# Altium footprint library LimeMicroAltiumLib.PcbLib: 876 footprints (part 36 of 57)
Each footprint in its own frame and in the unit in brackets; x right, y up, seen from the top. Pads: shape width x height; smd on the part's side, far side on the other; paste and mask are expansions set on the pad; w line width, h text height; cw(c..) or ccw(c..) is an arc to the next point about the centre after c.
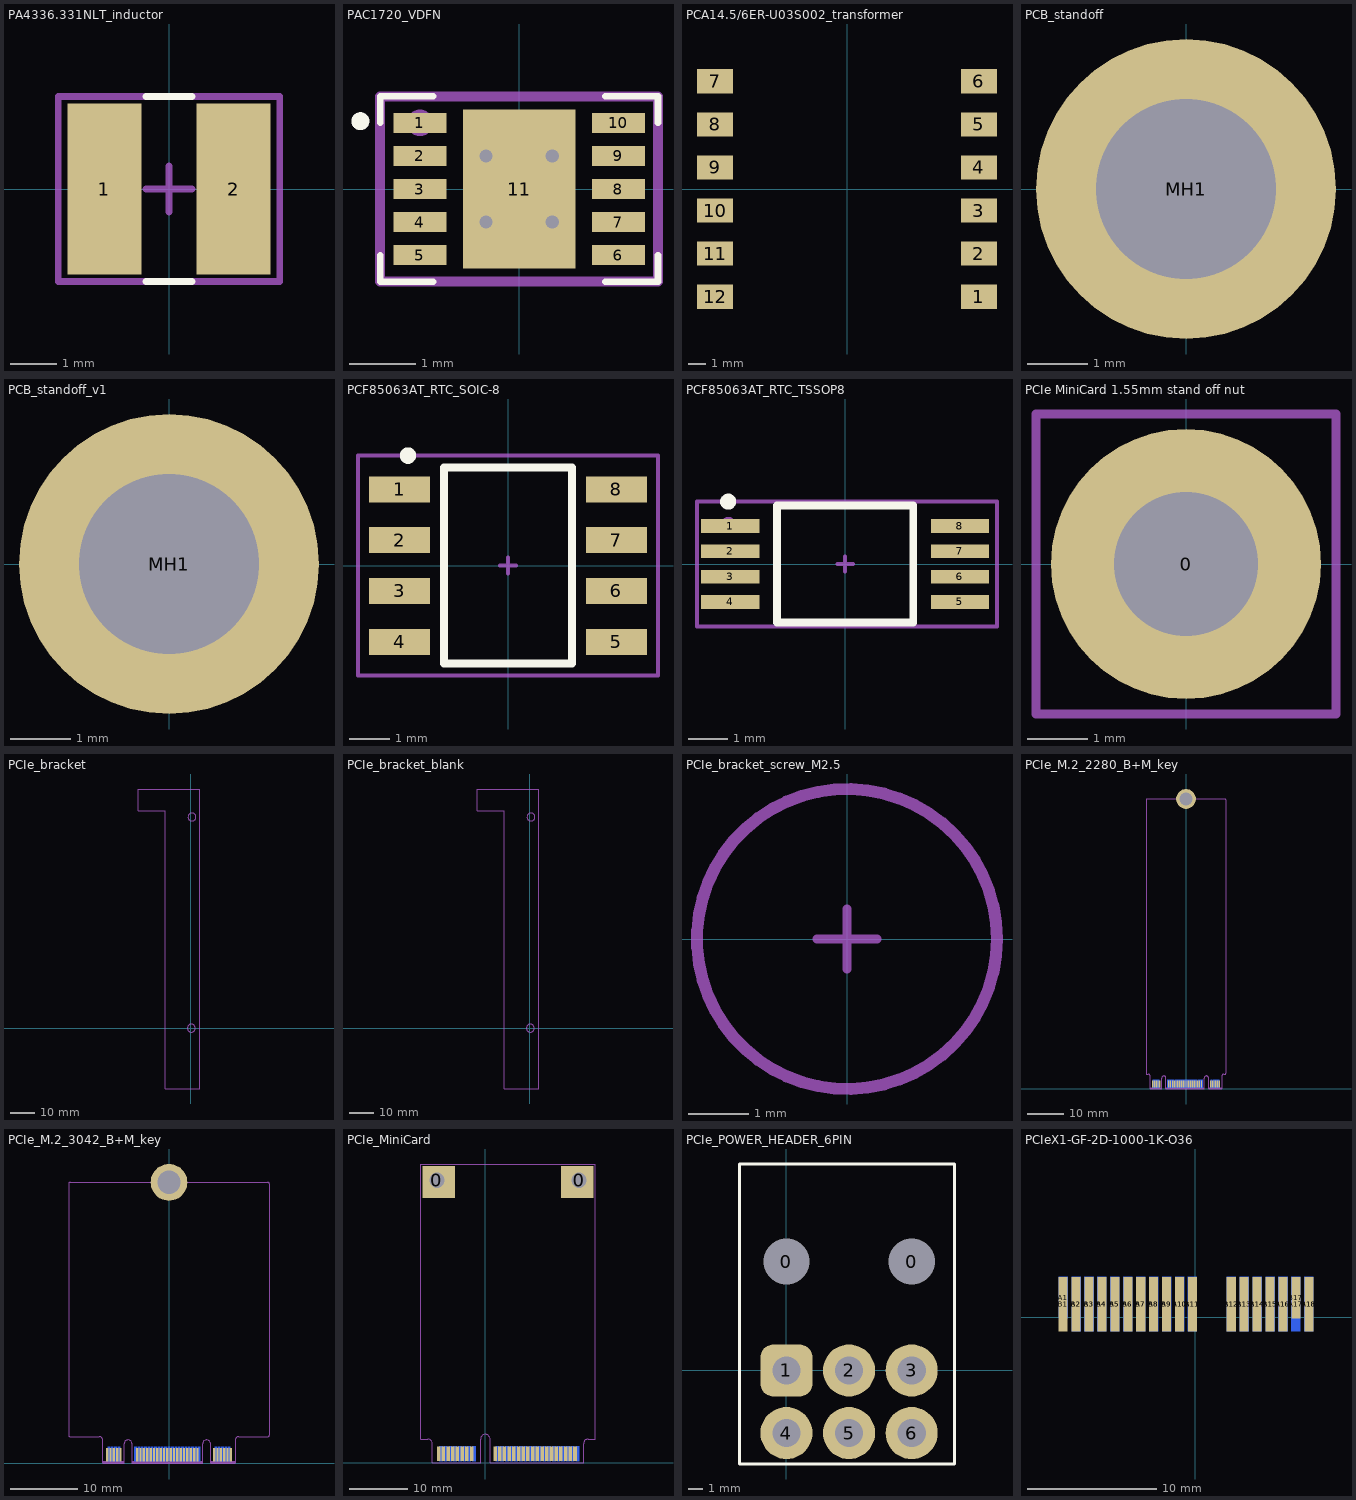
[diagram p35: the footprints below, top view; thin cyan lines are the x and y axes]

## PA4336.331NLT_inductor [mm] "PA4336.331NLT inductor"
pads (2):
  rect 1.6x3.7 smd mask+0.05: 1(-1.4,0) 2(1.4,0)
Top Overlay:
  lines w0.15: -0.5,-2 0.5,-2 ; -0.5,2 0.5,2
Mechanical 15:
  lines w0.15: -0.5,0 0.5,0 ; 0,-0.5 0,0.5 ; -2.4,-2 -2.4,2 2.4,2 2.4,-2 -2.4,-2
  text ".Designator" at 0,0 h0.55
  text "No polarity" at -1.6,-1.7 h0.3
3D body "User Library-nr3015_4x4.STEP": height 1.89, standoff -0.11, extent -2,-1.998 2.001,2.002

## PAC1720_VDFN [mm] "10-Lead Very Thin Plastic Dual Flat, No Lead Package (9Q) - 3x3 mm Body [VDFN]"
pads (11):
  rect 0.8x0.3 smd mask+0.05: 1(-1.5,1) 2(-1.5,0.5) 3(-1.5,0) 4(-1.5,-0.5) 5(-1.5,-1) 6(1.5,-1) 7(1.5,-0.5) 8(1.5,0) 9(1.5,0.5) 10(1.5,1)
  rect 1.7x2.4 smd mask+0.05: 11(0,0)
via -0.5,0.5 diameter 0.4 hole 0.2
via 0.5,0.5 diameter 0.4 hole 0.2
via 0.5,-0.5 diameter 0.4 hole 0.2
via -0.5,-0.5 diameter 0.4 hole 0.2
Top Overlay:
  circle w0.2: c-2.4,1.025 r0.035
  lines w0.1: -2.1,-1 -2.1,-1.4 -1.3,-1.4 ; -2.1,1 -2.1,1.4 -1.3,1.4 ; 1.3,-1.4 2.1,-1.4 2.1,-1 ; 1.3,1.4 2.1,1.4 2.1,1
Mechanical 15:
  circle w0.3: c-1.5,1 r0.05
  lines w0.15: -0.3,0 0.3,0 ; 0,-0.3 0,0.3 ; -2.1,-1.4 2.1,-1.4 2.1,1.4 -2.1,1.4 -2.1,-1.4
  text ".Designator" at 0,0 h0.55
3D body "User Library-My-DFN-10-3x3-0_5.STEP": height 0.8, standoff 0, extent -1.56,-1.55 1.56,1.55

## PCA14.5/6ER-U03S002_transformer [mm]
pads (12):
  rect 2.1x1.4 smd mask+0.05: 1(7.65,-6.25) 2(7.65,-3.75) 3(7.65,-1.25) 4(7.65,1.25) 5(7.65,3.75) 6(7.65,6.25) 7(-7.65,6.25) 8(-7.65,3.75) 9(-7.65,1.25) 10(-7.65,-1.25) 11(-7.65,-3.75) 12(-7.65,-6.25)

## PCB_standoff [mm]
pads (1):
  round 5 hole 3: MH1(0,0)
Mechanical 15:
  lines w0.15: -2.2,0 0,0 ; 0,-2.2 0,0 ; 0,2.2 0,0 ; 2.2,0 0,0
  text ".Designator" at 0,0 h0.55
3D body "Hex Spacer MF M3 L5mm.stp": height 5.2, standoff -5.8, extent -2.862,-2.5 2.912,2.5

## PCB_standoff_v1 [mm]
pads (1):
  round 5 hole 3: MH1(0,0)
Mechanical 15:
  lines w0.15: -2.2,0 0,0 ; 0,-2.2 0,0 ; 0,2.2 0,0 ; 2.2,0 0,0
  text ".Designator" at 0,0 h0.55
3D body "14952.stp": height 6.5, standoff -2.95, extent -3.2,-3.2 3.2,3.2

## PCF85063AT_RTC_SOIC-8 [mm]
pads (8):
  rect 1.525x0.65 smd: 1(-2.712,1.905) 2(-2.712,0.635) 3(-2.712,-0.635) 4(-2.712,-1.905) 5(2.712,-1.905) 6(2.712,-0.635) 7(2.712,0.635) 8(2.712,1.905)
Top Overlay:
  circle w0.254: c-2.5,2.75 r0.079
  lines w0.2: -1.6,-2.45 -1.6,2.45 1.6,2.45 1.6,-2.45 -1.6,-2.45
Mechanical 15:
  circle w0.254: c-2.675,1.925 r0.079
  lines w0.1: -0.2,0 0,0 ; 0,-0.2 0,0 ; 0,0.2 0,0 ; 0.2,0 0,0 ; -3.75,-2.75 -3.75,2.75 3.75,2.75 3.75,-2.75 -3.75,-2.75
  text ".Designator" at 0,0 h0.55
3D body "AD8131ARZ.stp": height 1.75, standoff 0, extent -3,-2.45 3,2.45

## PCF85063AT_RTC_TSSOP8 [mm]
pads (8):
  rect 1.5x0.35 smd mask+0.05: 1(-2.95,0.975) 2(-2.95,0.325) 3(-2.95,-0.325) 4(-2.95,-0.975) 5(2.95,-0.975) 6(2.95,-0.325) 7(2.95,0.325) 8(2.95,0.975)
Top Overlay:
  circle w0.254: c-3,1.6 r0.079
  lines w0.2: -1.75,-1.5 1.75,-1.5 1.75,1.5 -1.75,1.5 -1.75,-1.5
Mechanical 15:
  circle w0.254: c-3,1 r0.079
  lines w0.1: -0.2,0 0,0 ; 0,-0.2 0,0 ; 0,0.2 0,0 ; 0.2,0 0,0 ; -3.8,-1.6 3.9,-1.6 3.9,1.6 -3.8,1.6 -3.8,-1.6
  text ".Designator" at 0,0 h0.55
3D body "User Library-TSSOP-8.STEP": height 1.2, standoff 0, extent -3.2,-1.5 3.2,1.5

## PCIe MiniCard 1.55mm stand off nut [mm] "PCIe MiniCard connector mounting stand off nut"
height 1.55
pads (1):
  round 4.5 hole 2.4 unplated: 0(0,0)
Top Paste:
  lines w1: -1.723,-0.304 cw(c0,0) -0.599,1.644 ; -1.125,-1.341 ccw(c0,0) 1.125,-1.341 ; 0.599,1.644 cw(c0,0) 1.723,-0.304
Bottom Solder:
  circle w1.25: c0,0 r0.65
Mechanical 15:
  lines w0.15: -1.2,0 0,0 ; 0,-1.2 0,0 ; 0,1.2 0,0 ; 1.2,0 0,0 ; -2.5,-2.5 2.5,-2.5 2.5,2.5 -2.5,2.5 -2.5,-2.5
  text ".Designator" at 0,0 h0.55
3D body "Soldered M2 stand-off D4 H1.55.stp": height 1.55, standoff -0.6, extent -2.002,-2 1.998,2

## PCIe_bracket [mm]
Mechanical 1:
  circle w0.25: c0.275,0 r1.601
  circle w0.25: c0.525,85.4 r1.601
Mechanical 15:
  circle w0.25: c0.525,85.4 r1.601
  circle w0.25: c0.275,0 r1.601
  lines w0.15: -21.2,87.975 -10.225,87.975 -10.225,-24.575 3.7,-24.575 3.7,96.725 -21.2,96.725 -21.2,87.975
  text "PCIe bracket assembly : bracket is mounted on the bottom PCB side and screwed in two places." at -8.075,-23.875 h0.9
  text "Screws are threaded from the top side." at -8,58 h0.9
  text ".Designator" at -6.075,-23.825 h0.55
3D body "User Library-SMA-2.step": height 11.25, standoff 0.75, extent -18.625,-4.1 16.375,6.4
3D body "User Library-SMA-2.step": height 11.25, standoff 0.75, extent -18.625,82.15 16.375,92.65
3D body "User Library-SMA-2.step": height 11.25, standoff 0.75, extent -18.625,8.15 16.375,18.65
3D body "User Library-SMA-2.step": height 11.25, standoff 0.75, extent -18.625,20.4 16.375,30.9
3D body "User Library-SMA-2.step": height 11.25, standoff 0.75, extent -18.625,32.65 16.375,43.15
3D body "User Library-SMA-2.step": height 11.25, standoff 0.75, extent -18.625,44.9 16.375,55.4
3D body "User Library-SMA-2.step": height 11.25, standoff 0.75, extent -18.625,57.15 16.375,67.65
3D body "User Library-SMA-2.step": height 11.25, standoff 0.75, extent -18.625,69.4 16.375,79.9
3D body "PCIE card IO panel_v2.STEP": height 14.99, standoff -6.6, extent -20.405,-24.518 3.598,96.795

## PCIe_bracket_blank [mm]
Mechanical 1:
  circle w0.25: c0.525,85.4 r1.601
  circle w0.25: c0.275,0 r1.601
Mechanical 15:
  circle w0.25: c0.275,0 r1.601
  circle w0.25: c0.525,85.4 r1.601
  lines w0.15: -21.2,87.975 -21.2,96.725 3.7,96.725 3.7,-24.575 -10.225,-24.575 -10.225,87.975 -21.2,87.975
  text ".Designator" at -6.075,-23.825 h0.55
  text "Screws are threaded from the top side." at -8,58 h0.9
  text "PCIe bracket assembly : bracket is mounted on the bottom PCB side and screwed in two places." at -8.075,-23.875 h0.9
3D body "PCIE card IO panel_v2.STEP": height 14.99, standoff -6.6, extent -20.405,-24.518 3.598,96.795

## PCIe_bracket_screw_M2.5 [mm]
Mechanical 15:
  circle w0.2: c0,0 r2.5
  lines w0.15: -0.5,0 0.5,0 ; 0,-0.5 0,0.5
  text ".Designator" at 0,0 h0.55
3D body "User Library-M2_5-A4-socket-cap-screw-din 912.step": height 2.5, standoff -6, extent -2.25,-2.25 2.25,2.25

## PCIe_M.2_2280_B+M_key [mm]
pads (60):
  round 5.5 / inner round 0 / far side round 5.5 hole 3.5: MOUNTING-HOLE(0,80)
  rect 0.35x2 smd paste-2: P1(9.25,1.3) P3(8.75,1.3) P5(8.25,1.3) P7(7.75,1.3) P9(7.25,1.3) P11(6.75,1.3) P21(4.25,1.3) P23(3.75,1.3) P25(3.25,1.3) P27(2.75,1.3) P29(2.25,1.3) P31(1.75,1.3) P33(1.25,1.3) P35(0.75,1.3) P37(0.25,1.3) P39(-0.25,1.3) P41(-0.75,1.3) P43(-1.25,1.3) P45(-1.75,1.3) P47(-2.25,1.3) P49(-2.75,1.3) P51(-3.25,1.3) P53(-3.75,1.3) P55(-4.25,1.3) P57(-4.75,1.3) P67(-7.25,1.3) P69(-7.75,1.3) P71(-8.25,1.3) P73(-8.75,1.3) P75(-9.25,1.3)
  rect 0.35x2.2 smd far side paste-2: P2(9,1.4) P4(8.5,1.4) P6(8,1.4) P8(7.5,1.4) P10(7,1.4) P20(4.5,1.4) P22(4,1.4) P24(3.5,1.4) P26(3,1.4) P28(2.5,1.4) P30(2,1.4) P32(1.5,1.4) P34(1,1.4) P36(0.5,1.4) P38(0,1.4) P40(-0.5,1.4) P42(-1,1.4) P44(-1.5,1.4) P46(-2,1.4) P48(-2.5,1.4) P50(-3,1.4) P52(-3.5,1.4) P54(-4,1.4) P56(-4.5,1.4) P58(-5,1.4) P68(-7.5,1.4) P70(-8,1.4) P72(-8.5,1.4) P74(-9,1.4)
Top Solder:
  rectangle: -10,-0.1 10,2.45
Bottom Solder:
  rectangle: -10,-0.1 10,2.6
Mechanical 1:
  region: -9.925,0 -9.925,0.3 -6.725,0.3 -6.725,0
  region: -5.525,0 -5.525,0.3 5.025,0.3 5.025,0
  region: 6.225,0 6.225,0.3 9.925,0.3 9.925,0
  lines w0.15: -11,4.2 ccw(c-10.8,4.2) -10.8,4 -10.425,4 cw(c-10.425,3.5) -9.925,3.5 -9.925,0 -6.725,0 -6.725,2.9 cw(c-6.125,2.9) -5.525,2.9 -5.525,0 5.025,0 5.025,2.9 cw(c5.625,2.9) 6.225,2.9 6.225,0 9.925,0 9.925,3.5 cw(c10.425,3.5) 10.425,4 10.8,4 ccw(c10.8,4.2) 11,4.2 11,79.8 ccw(c10.8,79.8) 10.8,80 0,80 -10.8,80 ccw(c-10.8,79.8) -11,79.8 -11,4.2
Mechanical 15:
  lines w0.15: -11,4.2 ccw(c-10.8,4.2) -10.8,4 -10.425,4 cw(c-10.425,3.5) -9.925,3.5 -9.925,0 -6.725,0 -6.725,2.9 cw(c-6.125,2.9) -5.525,2.9 -5.525,0 5.025,0 5.025,2.9 cw(c5.625,2.9) 6.225,2.9 6.225,0 9.925,0 9.925,3.5 cw(c10.425,3.5) 10.425,4 10.8,4 ccw(c10.8,4.2) 11,4.2 11,79.8 ccw(c10.8,79.8) 10.8,80 0,80 -10.8,80 ccw(c-10.8,79.8) -11,79.8 -11,4.2

## PCIe_M.2_3042_B+M_key [mm]
pads (60):
  round 5.5 / inner round 0 / far side round 5.5 hole 3.5: MOUNTING-HOLE(0,42)
  rect 0.35x2 smd paste-2: P1(9.25,1.3) P3(8.75,1.3) P5(8.25,1.3) P7(7.75,1.3) P9(7.25,1.3) P11(6.75,1.3) P21(4.25,1.3) P23(3.75,1.3) P25(3.25,1.3) P27(2.75,1.3) P29(2.25,1.3) P31(1.75,1.3) P33(1.25,1.3) P35(0.75,1.3) P37(0.25,1.3) P39(-0.25,1.3) P41(-0.75,1.3) P43(-1.25,1.3) P45(-1.75,1.3) P47(-2.25,1.3) P49(-2.75,1.3) P51(-3.25,1.3) P53(-3.75,1.3) P55(-4.25,1.3) P57(-4.75,1.3) P67(-7.25,1.3) P69(-7.75,1.3) P71(-8.25,1.3) P73(-8.75,1.3) P75(-9.25,1.3)
  rect 0.35x2.2 smd far side paste-2: P2(9,1.4) P4(8.5,1.4) P6(8,1.4) P8(7.5,1.4) P10(7,1.4) P20(4.5,1.4) P22(4,1.4) P24(3.5,1.4) P26(3,1.4) P28(2.5,1.4) P30(2,1.4) P32(1.5,1.4) P34(1,1.4) P36(0.5,1.4) P38(0,1.4) P40(-0.5,1.4) P42(-1,1.4) P44(-1.5,1.4) P46(-2,1.4) P48(-2.5,1.4) P50(-3,1.4) P52(-3.5,1.4) P54(-4,1.4) P56(-4.5,1.4) P58(-5,1.4) P68(-7.5,1.4) P70(-8,1.4) P72(-8.5,1.4) P74(-9,1.4)
Top Solder:
  rectangle: -10,-0.1 10,2.45
Bottom Solder:
  rectangle: -10,-0.1 10,2.6
Mechanical 1:
  region: 6.225,0 6.225,0.3 9.925,0.3 9.925,0
  region: -5.525,0 -5.525,0.3 5.025,0.3 5.025,0
  region: -9.925,0 -9.925,0.3 -6.725,0.3 -6.725,0
  lines w0.15: -10.8,42 0,42 10.8,42 ; -15,4.2 ccw(c-14.8,4.2) -14.8,4 -10.425,4 cw(c-10.425,3.5) -9.925,3.5 -9.925,0 -6.725,0 -6.725,2.9 cw(c-6.125,2.9) -5.525,2.9 -5.525,0 5.025,0 5.025,2.9 cw(c5.625,2.9) 6.225,2.9 6.225,0 9.925,0 9.925,3.5 cw(c10.425,3.5) 10.425,4 14.8,4 ccw(c14.8,4.2) 15,4.2 15,41.8 ccw(c14.8,41.8) 14.8,42 -14.8,42 ccw(c-14.8,41.8) -15,41.8 -15,4.2
Mechanical 15:
  lines w0.15: -10.8,42 0,42 10.8,42 ; -15,4.2 ccw(c-14.8,4.2) -14.8,4 -10.425,4 cw(c-10.425,3.5) -9.925,3.5 -9.925,0 -6.725,0 -6.725,2.9 cw(c-6.125,2.9) -5.525,2.9 -5.525,0 5.025,0 5.025,2.9 cw(c5.625,2.9) 6.225,2.9 6.225,0 9.925,0 9.925,3.5 cw(c10.425,3.5) 10.425,4 14.8,4 ccw(c14.8,4.2) 15,4.2 15,41.8 ccw(c14.8,41.8) 14.8,42 -14.8,42 ccw(c-14.8,41.8) -15,41.8 -15,4.2

## PCIe_MiniCard [mm]
pads (54):
  rect 5.5x5.5 hole 2.6 copper offset 0.3,-0.3 paste-2 mask+0: 0(-8.25,48.05)
  rect 5.5x5.5 hole 2.6 copper offset -0.3,-0.3 paste-2 mask+0: 0(15.95,48.05)
  rect 0.6x2.5 smd paste-2: 1(-7.95,1.5) 3(-7.15,1.5) 5(-6.35,1.5) 7(-5.55,1.5) 9(-4.75,1.5) 11(-3.95,1.5) 13(-3.15,1.5) 15(-2.35,1.5) 17(1.65,1.5) 19(2.45,1.5) 21(3.25,1.5) 23(4.05,1.5) 25(4.85,1.5) 27(5.65,1.5) 29(6.45,1.5) 31(7.25,1.5) 33(8.05,1.5) 35(8.85,1.5) 37(9.65,1.5) 39(10.45,1.5) 41(11.25,1.5) 43(12.05,1.5) 45(12.85,1.5) 47(13.65,1.5) 49(14.45,1.5) 51(15.25,1.5)
  rect 0.6x2.5 smd far side paste-2: 2(-7.55,1.5) 4(-6.75,1.5) 6(-5.95,1.5) 8(-5.15,1.5) 10(-4.35,1.5) 12(-3.55,1.5) 14(-2.75,1.5) 16(-1.95,1.5) 18(2.05,1.5) 20(2.85,1.5) 22(3.65,1.5) 24(4.45,1.5) 26(5.25,1.5) 28(6.05,1.5) 30(6.85,1.5) 32(7.65,1.5) 34(8.45,1.5) 36(9.25,1.5) 38(10.05,1.5) 40(10.85,1.5) 42(11.65,1.5) 44(12.45,1.5) 46(13.25,1.5) 48(14.05,1.5) 50(14.85,1.5) 52(15.65,1.5)
Top Solder:
  rectangle: -9.25,-0.25 17,2.875
Bottom Solder:
  rectangle: -9.25,-0.25 17,2.875
Mechanical 1:
  circle w0.1: c15.95,48.05 r1.3
  circle w0.1: c-8.25,48.05 r1.3
Mechanical 15:
  lines w0.15: -11,4 -9.8,4 cw(c-9.8,3.2) -9,3.2 -9,0 -0.8,0 -0.8,4 cw(c0,4) 0.8,4 0.8,0 16.7,0 16.7,3.2 cw(c17.5,3.2) 17.5,4 18.7,4 18.7,50.8 -11,50.8 -11,4

## PCIe_POWER_HEADER_6PIN [mm]
pads (8):
  round 3 hole 3.1: 0(0,7.3) 0(8.4,7.3)
  rrect50% 3.5x3.5 hole 1.9: 1(0,0)
  round 3.5 hole 1.9: 2(4.2,0) 3(8.4,0) 4(0,-4.2) 5(4.2,-4.2) 6(8.4,-4.2)
Top Overlay:
  lines w0.2: -3.15,-6.275 11.275,-6.275 11.275,13.85 -3.15,13.85 -3.15,-6.275
Mechanical 15:
  lines w0.15: -3.15,-6.275 -3.15,13.85 11.275,13.85 11.275,-6.275 -3.15,-6.275
  text ".Designator" at 4.25,-2.75 h0.55
  text "PCB edge" at 1.975,12.675 h0.55
3D body "455580003.stp": height 11.2, standoff -3.81, extent -3.05,-4.725 11.15,13.91

## PCIeX1-GF-2D-1000-1K-O36 [mm]
pads (36):
  rect 0.7x3.2 smd far side paste-1: A1(-10.2,1.525)
  rect 0.7x4.2 smd far side paste-1: A2(-9.2,1.025) A3(-8.2,1.025) A4(-7.2,1.025) A5(-6.2,1.025) A6(-5.2,1.025) A7(-4.2,1.025) A8(-3.2,1.025) A9(-2.2,1.025) A10(-1.2,1.025) A11(-0.2,1.025) A12(2.8,1.025) A13(3.8,1.025) A14(4.8,1.025) A15(5.8,1.025) A16(6.8,1.025) A17(7.8,1.025) A18(8.8,1.025)
  rect 0.7x4.2 smd paste-1: B1(-10.2,1.025) B2(-9.2,1.025) B3(-8.2,1.025) B4(-7.2,1.025) B5(-6.2,1.025) B6(-5.2,1.025) B7(-4.2,1.025) B8(-3.2,1.025) B9(-2.2,1.025) B10(-1.2,1.025) B11(-0.2,1.025) B12(2.8,1.025) B13(3.8,1.025) B14(4.8,1.025) B15(5.8,1.025) B16(6.8,1.025) B18(8.8,1.025)
  rect 0.7x3.2 smd paste-1: B17(7.8,1.525)
Top Solder:
  rectangle: -11.1,-2.725 9.7,3.25
Bottom Solder:
  rectangle: -11.1,-2.725 9.7,3.25